# Altium footprint library CoilcraftPCB.PcbLib: 320 footprints (part 10 of 20)
Each footprint in its own frame and in the unit in brackets; x right, y up, seen from the top. Pads: shape width x height; smd on the part's side, far side on the other; paste and mask are expansions set on the pad; w line width, h text height; cw(c..) or ccw(c..) is an arc to the next point about the centre after c.
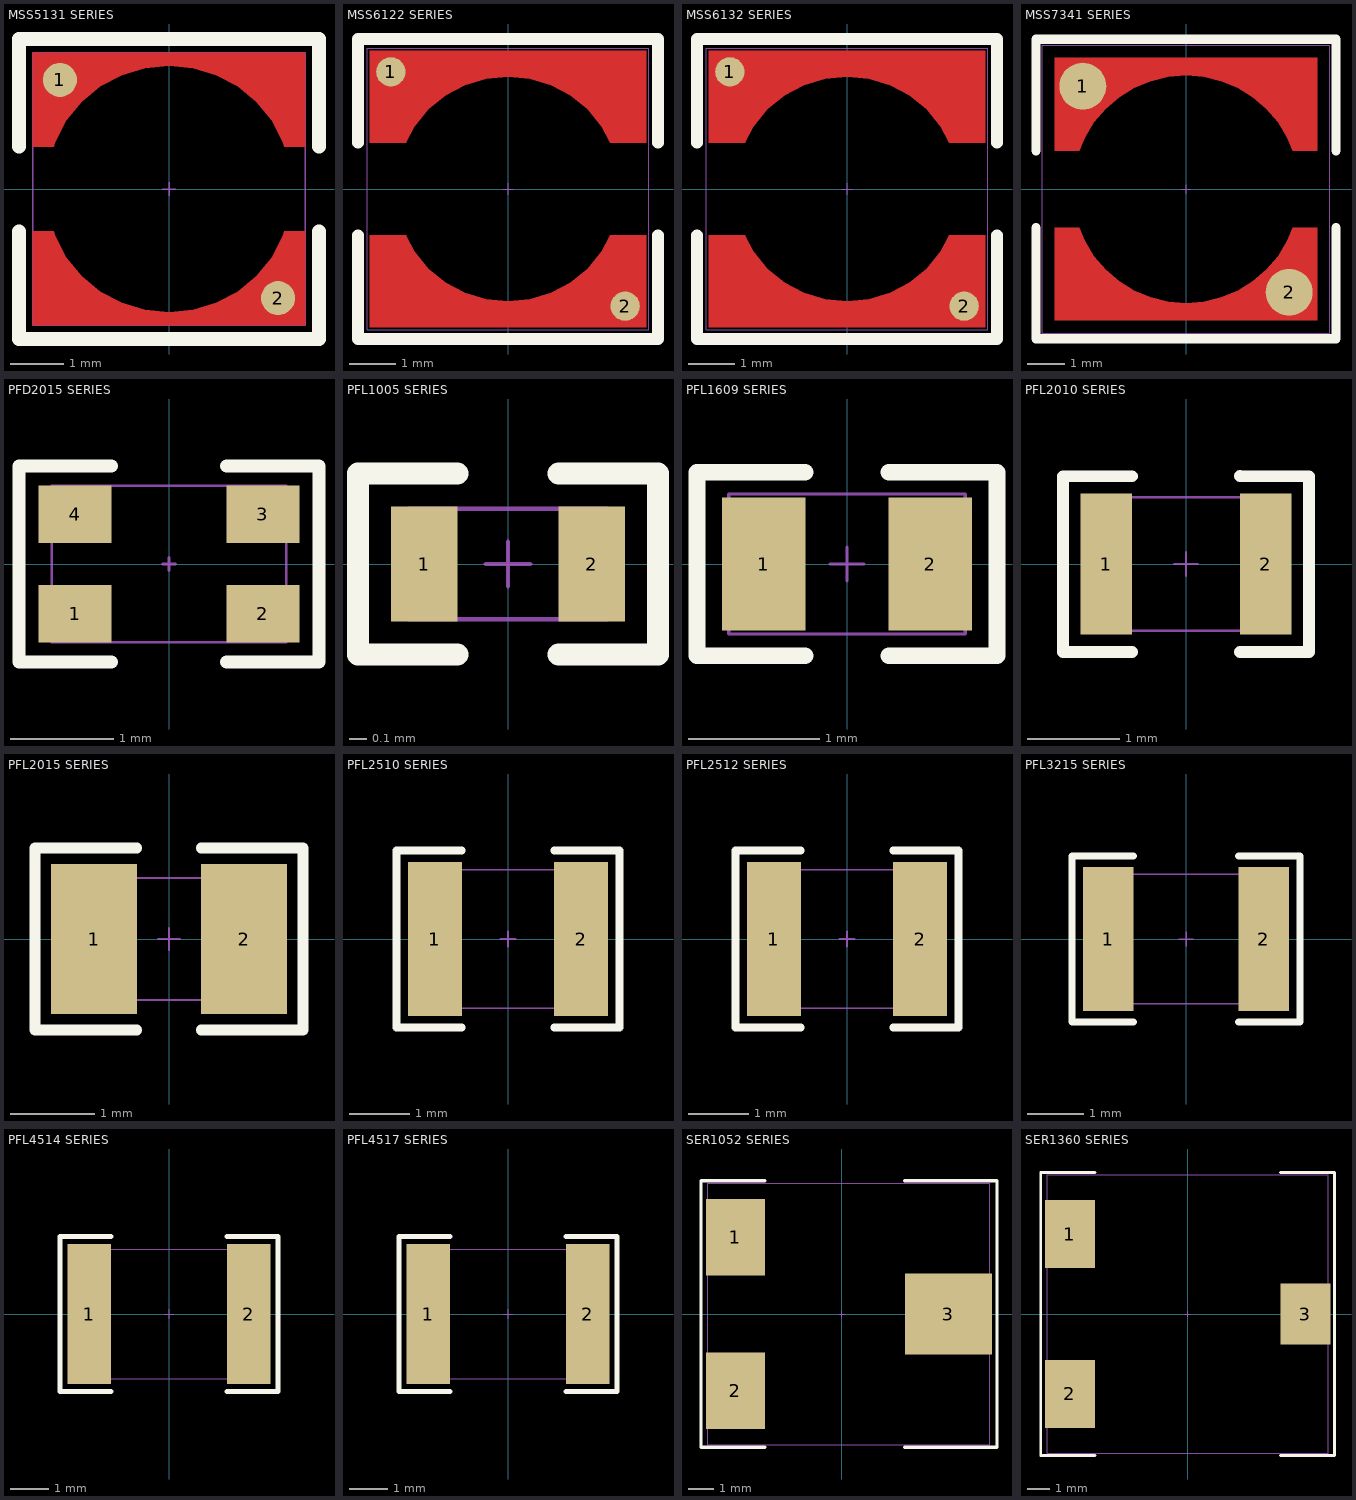
[diagram p9: the footprints below, top view; thin cyan lines are the x and y axes]

## MSS5131 SERIES [mil] "Coilcraft Shielded Power Inductors"
height 122
pads (2):
  round 25 smd mask+0: 1(-80,80) 2(80,-80)
Top Layer:
  region: -100,31 -84.49,31 -84.63,31.05 -83.55,34.61 -75.19,50.24 -63.95,63.95 -50.24,75.19 -34.61,83.55 -17.64,88.7 0,90.44 17.64,88.7 34.61,83.55 50.24,75.19 63.95,63.95 75.19,50.24 83.55,34.61 84.63,31.05 84.49,31 100,31 100,100 -100,100
  region: 100,-31 84.49,-31 84.63,-31.05 83.55,-34.61 75.19,-50.24 63.95,-63.95 50.24,-75.19 34.61,-83.55 17.64,-88.7 0,-90.44 -17.64,-88.7 -34.61,-83.55 -50.24,-75.19 -63.95,-63.95 -75.19,-50.24 -83.55,-34.61 -84.63,-31.05 -84.49,-31 -100,-31 -100,-100 100,-100
Top Overlay:
  lines w10: -110,-31 -110,-110 110,-110 110,-31 ; -110,31 -110,110 110,110 110,31
Top Paste:
  region: 100,-31 84.49,-31 84.63,-31.05 83.55,-34.61 75.19,-50.24 63.95,-63.95 50.24,-75.19 34.61,-83.55 17.64,-88.7 0,-90.44 -17.64,-88.7 -34.61,-83.55 -50.24,-75.19 -63.95,-63.95 -75.19,-50.24 -83.55,-34.61 -84.63,-31.05 -84.49,-31 -100,-31 -100,-100 100,-100
  region: -100,31 -84.49,31 -84.63,31.05 -83.55,34.61 -75.19,50.24 -63.95,63.95 -50.24,75.19 -34.61,83.55 -17.64,88.7 0,90.44 17.64,88.7 34.61,83.55 50.24,75.19 63.95,63.95 75.19,50.24 83.55,34.61 84.63,31.05 84.49,31 100,31 100,100 -100,100
Mechanical 13:
  lines w1: -5,0 5,0 ; 0,-5 0,5
Mechanical 14:
  lines w1: -100,-100 -100,100 100,100 100,-100 -100,-100
3D body: height 122.17, standoff 0.13, extent -106.24,-106.24 106.24,106.24

## MSS6122 SERIES [mil] "Coilcraft Shielded Power Inductors"
height 87
pads (2):
  round 25 smd mask+0: 1(-100,100) 2(100,-100)
Top Layer:
  region: 118,-39.5 118,-118 -118,-118 -118,-39.5 -86.96,-39.5 -87.14,-39.56 -79.79,-53.31 -67.86,-67.86 -53.31,-79.79 -36.72,-88.66 -18.72,-94.12 0,-95.96 18.72,-94.12 36.72,-88.66 53.31,-79.79 67.86,-67.86 79.79,-53.31 87.14,-39.56 86.96,-39.48 86.96,-39.5
  region: -118,39.5 -118,118 118,118 118,39.5 86.96,39.5 87.14,39.56 79.79,53.31 67.86,67.86 53.31,79.79 36.72,88.66 18.72,94.12 0,95.96 -18.72,94.12 -36.72,88.66 -53.31,79.79 -67.86,67.86 -79.79,53.31 -87.14,39.56 -86.96,39.48 -86.96,39.5
Top Overlay:
  lines w10: -128,-39.5 -128,-128 128,-128 128,-39.5 ; -128,39.5 -128,128 128,128 128,39.5
Top Paste:
  region: -118,39.5 -118,118 118,118 118,39.5 86.96,39.5 87.14,39.56 79.79,53.31 67.86,67.86 53.31,79.79 36.72,88.66 18.72,94.12 0,95.96 -18.72,94.12 -36.72,88.66 -53.31,79.79 -67.86,67.86 -79.79,53.31 -87.14,39.56 -86.96,39.48 -86.96,39.5
  region: 118,-39.5 118,-118 -118,-118 -118,-39.5 -86.96,-39.5 -87.14,-39.56 -79.79,-53.31 -67.86,-67.86 -53.31,-79.79 -36.72,-88.66 -18.72,-94.12 0,-95.96 18.72,-94.12 36.72,-88.66 53.31,-79.79 67.86,-67.86 79.79,-53.31 87.14,-39.56 86.96,-39.48 86.96,-39.5
Mechanical 13:
  lines w1: -5,0 5,0 ; 0,-5 0,5
Mechanical 14:
  lines w1: -120,-120 120,-120 120,120 -120,120 -120,-120
3D body: height 86.74, standoff 0.13, extent -118,-118 117.99,117.99

## MSS6132 SERIES [mil] "Coilcraft Shielded Power Inductors"
height 126
pads (2):
  round 25 smd mask+0: 1(-100,100) 2(100,-100)
Top Layer:
  region: 118,-39.5 118,-118 -118,-118 -118,-39.5 -86.96,-39.5 -87.14,-39.56 -79.79,-53.31 -67.86,-67.86 -53.31,-79.79 -36.72,-88.66 -18.72,-94.12 0,-95.96 18.72,-94.12 36.72,-88.66 53.31,-79.79 67.86,-67.86 79.79,-53.31 87.14,-39.56 86.96,-39.48 86.96,-39.5
  region: -118,39.5 -118,118 118,118 118,39.5 86.96,39.5 87.14,39.56 79.79,53.31 67.86,67.86 53.31,79.79 36.72,88.66 18.72,94.12 0,95.96 -18.72,94.12 -36.72,88.66 -53.31,79.79 -67.86,67.86 -79.79,53.31 -87.14,39.56 -86.96,39.48 -86.96,39.5
Top Overlay:
  lines w10: -128,-39.5 -128,-128 128,-128 128,-39.5 ; -128,39.5 -128,128 128,128 128,39.5
Top Paste:
  region: -118,39.5 -118,118 118,118 118,39.5 86.96,39.5 87.14,39.56 79.79,53.31 67.86,67.86 53.31,79.79 36.72,88.66 18.72,94.12 0,95.96 -18.72,94.12 -36.72,88.66 -53.31,79.79 -67.86,67.86 -79.79,53.31 -87.14,39.56 -86.96,39.48 -86.96,39.5
  region: 118,-39.5 118,-118 -118,-118 -118,-39.5 -86.96,-39.5 -87.14,-39.56 -79.79,-53.31 -67.86,-67.86 -53.31,-79.79 -36.72,-88.66 -18.72,-94.12 0,-95.96 18.72,-94.12 36.72,-88.66 53.31,-79.79 67.86,-67.86 79.79,-53.31 87.14,-39.56 86.96,-39.48 86.96,-39.5
Mechanical 13:
  lines w1: -5,0 5,0 ; 0,-5 0,5
Mechanical 14:
  lines w1: -120,-120 120,-120 120,120 -120,120 -120,-120
3D body: height 126.11, standoff 0.13, extent -117.99,-117.99 118,118

## MSS7341 SERIES [mil] "Coilcraft Shielded Power Inductors"
height 161
pads (2):
  round 50 smd mask+0: 1(-110,110) 2(110,-110)
Top Layer:
  region: 140,-41 140,-140 -140,-140 -140,-41 -113.97,-41.05 -108.15,-55.1 -98.19,-71.34 -85.82,-85.82 -71.34,-98.19 -55.1,-108.15 -37.51,-115.43 -18.99,-119.88 0,-121.37 18.99,-119.88 37.51,-115.43 55.1,-108.15 71.34,-98.19 85.82,-85.82 98.19,-71.34 108.15,-55.1 113.97,-41.05 113.84,-41
  region: -140,41 -140,140 140,140 140,41 113.84,41 113.97,41.05 108.15,55.1 98.19,71.34 85.82,85.82 71.34,98.19 55.1,108.15 37.51,115.43 18.99,119.88 0,121.37 -18.99,119.88 -37.51,115.43 -55.1,108.15 -71.34,98.19 -85.82,85.82 -98.19,71.34 -108.15,55.1 -113.97,41.05 -113.84,41
Top Overlay:
  lines w10: -160,-41 -160,-159.5 160,-159.5 160,-41 ; -160,41 -160,160 160,160 160,41
Top Paste:
  region: -140,41 -140,140 140,140 140,41 113.84,41 113.97,41.05 108.15,55.1 98.19,71.34 85.82,85.82 71.34,98.19 55.1,108.15 37.51,115.43 18.99,119.88 0,121.37 -18.99,119.88 -37.51,115.43 -55.1,108.15 -71.34,98.19 -85.82,85.82 -98.19,71.34 -108.15,55.1 -113.97,41.05 -113.84,41
  region: 140,-41 140,-140 -140,-140 -140,-41 -113.97,-41.05 -108.15,-55.1 -98.19,-71.34 -85.82,-85.82 -71.34,-98.19 -55.1,-108.15 -37.51,-115.43 -18.99,-119.88 0,-121.37 18.99,-119.88 37.51,-115.43 55.1,-108.15 71.34,-98.19 85.82,-85.82 98.19,-71.34 108.15,-55.1 113.97,-41.05 113.84,-41
Mechanical 13:
  lines w1: -5,0 5,0 ; 0,-5 0,5
Mechanical 14:
  lines w1: -153.5,-153.5 153.5,-153.5 153.5,153.5 -153.5,153.5 -153.5,-153.5
3D body: height 161.54, standoff 0.13, extent -148.82,-148.82 148.81,148.81

## PFD2015 SERIES [mil] "Coilcraft Dual Coil Inductors"
height 59
pads (4):
  rect 28x22 smd: 1(-36,-19) 2(36,-19) 3(36,19) 4(-36,19)
Top Overlay:
  lines w5: -22,-37.5 -57.5,-37.5 -57.5,37.5 -22,37.5 ; 22,-37.5 57.5,-37.5 57.5,37.5 22,37.5
Mechanical 13:
  lines w1: -2.5,0 2.5,0 ; 0,-2.5 0,2.5
Mechanical 14:
  lines w1: -45,-30 -45,30 45,30 45,-30 -45,-30
3D body: height 55.91, standoff 0, extent -45.08,-29.92 45.08,29.92

## PFL1005 SERIES [mil] "Coilcraft Shielded Power Inductors"
height 28
pads (2):
  rect 15x26 smd: 1(-19,0) 2(19,0)
Top Overlay:
  lines w5: -11.5,-20.5 -34,-20.5 -34,20.5 -11.5,20.5 ; 11.5,-20.5 34,-20.5 34,20.5 11.5,20.5
Mechanical 13:
  lines w1: -5,0 5,0 ; 0,-5 0,5
Mechanical 14:
  lines w1: -22.5,-12.5 -22.5,12.5 22.5,12.5 22.5,-12.5 -22.5,-12.5
3D body: height 27.76, standoff -0.2, extent -22.5,-12.76 22.5,12.75

## PFL1609 SERIES [mil] "Coilcraft Shielded Power Inductors"
height 37
pads (2):
  rect 25x40 smd: 1(-25,0) 2(25,0)
Top Overlay:
  lines w5: -12.5,-27.5 -45,-27.5 -45,27.5 -12.5,27.5 ; 12.5,-27.5 45,-27.5 45,27.5 12.5,27.5
Mechanical 13:
  lines w1: -5,0 5,0 ; 0,-5 0,5
Mechanical 14:
  lines w1: -35.5,-21 35.5,-21 35.5,21 -35.5,21 -35.5,-21
3D body: height 37.01, standoff -0.39, extent -35.44,-21.06 35.43,21.07

## PFL2010 SERIES [mil] "Coilcraft Shielded Power Inductors"
height 39
pads (2):
  rect 22x60 smd: 1(-34,0) 2(34,0)
Top Overlay:
  lines w5: -23,-37.5 -52.5,-37.5 -52.5,37.5 -23,37.5 ; 23,-37.5 52.5,-37.5 52.5,37.5 23,37.5
Mechanical 13:
  lines w1: -5,0 5,0 ; 0,-5 0,5
Mechanical 14:
  lines w1: -43.5,-28.5 -43.5,28.5 43.5,28.5 43.5,-28.5 -43.5,-28.5
3D body: height 38.98, standoff -0.39, extent -43.31,-28.54 43.3,28.55

## PFL2015 SERIES [mil] "Coilcraft Shielded Power Inductors"
height 59
pads (2):
  rect 40x70 smd: 1(-35,0) 2(35,0)
Top Overlay:
  lines w5: -15,-42.5 -62.5,-42.5 -62.5,42.5 -15,42.5 ; 15,-42.5 62.5,-42.5 62.5,42.5 15,42.5
Mechanical 13:
  lines w1: -5,0 5,0 ; 0,-5 0,5
Mechanical 14:
  lines w1: -43.5,-28.5 43.5,-28.5 43.5,28.5 -43.5,28.5 -43.5,-28.5
3D body: height 58.66, standoff -0.39, extent -43.31,-28.54 43.3,28.55

## PFL2510 SERIES [mil] "Coilcraft Shielded Power Inductors"
height 40
pads (2):
  rect 35x100 smd: 1(-47.5,0) 2(47.5,0)
Top Overlay:
  lines w5: -30,-57.5 -72.5,-57.5 -72.5,57.5 -30,57.5 ; 30,-57.5 72.5,-57.5 72.5,57.5 30,57.5
Mechanical 13:
  lines w1: -5,0 5,0 ; 0,-5 0,5
Mechanical 14:
  lines w1: -55,-45 -55,45 55,45 55,-45 -55,-45
3D body: height 39.76, standoff -0.39, extent -54.92,-45 54.92,45

## PFL2512 SERIES [mil] "Coilcraft Shielded Power Inductors"
height 48
pads (2):
  rect 35x100 smd: 1(-47.5,0) 2(47.5,0)
Top Overlay:
  lines w5: -30,-57.5 -72.5,-57.5 -72.5,57.5 -30,57.5 ; 30,-57.5 72.5,-57.5 72.5,57.5 30,57.5
Mechanical 13:
  lines w1: -5,0 5,0 ; 0,-5 0,5
Mechanical 14:
  lines w1: -55,-45 55,-45 55,45 -55,45 -55,-45
3D body: height 47.64, standoff -0.39, extent -54.92,-45 54.92,45

## PFL3215 SERIES [mil] "Coilcraft Shielded Power Inductors"
height 59
pads (2):
  rect 35x100 smd: 1(-54,0) 2(54,0)
Top Overlay:
  lines w5: -36.5,-57.5 -79,-57.5 -79,57.5 -36.5,57.5 ; 36.5,-57.5 79,-57.5 79,57.5 36.5,57.5
Mechanical 13:
  lines w1: -5,0 5,0 ; 0,-5 0,5
Mechanical 14:
  lines w1: -63,-45 -63,45 63,45 63,-45 -63,-45
3D body: height 58.66, standoff -0.39, extent -62.99,-45 63,45

## PFL4514 SERIES [mil] "Coilcraft Shielded Power Inductors"
height 55
pads (2):
  rect 45x145 smd: 1(-82.5,0) 2(82.5,0)
Top Overlay:
  lines w5: -60,-80 -112.5,-80 -112.5,80 -60,80 ; 60,-80 112.5,-80 112.5,80 60,80
Mechanical 13:
  lines w1: -5,0 5,0 ; 0,-5 0,5
Mechanical 14:
  lines w1: -96.5,-67 96.5,-67 96.5,67 -96.5,67 -96.5,-67
3D body: height 53.15, standoff -0.39, extent -96.46,-66.92 96.45,66.93

## PFL4517 SERIES [mil] "Coilcraft Shielded Power Inductors"
height 67
pads (2):
  rect 45x145 smd: 1(-82.5,0) 2(82.5,0)
Top Overlay:
  lines w5: -60,-80 -112.5,-80 -112.5,80 -60,80 ; 60,-80 112.5,-80 112.5,80 60,80
Mechanical 13:
  lines w1: -5,0 5,0 ; 0,-5 0,5
Mechanical 14:
  lines w1: -96.5,-67 96.5,-67 96.5,67 -96.5,67 -96.5,-67
3D body: height 64.96, standoff -0.39, extent -96.46,-66.92 96.45,66.93

## SER1052 SERIES [mil] "Coilcraft Shielded Power Inductors"
height 205
pads (3):
  rect 91x118 smd: 1(-163.75,118) 2(-163.75,-118)
  rect 134x125 smd: 3(163.75,0)
Top Overlay:
  lines w5: -118.5,-205 -216.5,-205 -216.5,205 -118.5,205 ; 96.5,-205 238.5,-205 238.5,204.99 96.5,205
Mechanical 13:
  lines w1: -5,0 5,0 ; 0,-5 0,5
Mechanical 14:
  lines w1: -206.5,-201 -206.5,201 227,201 227,-201 -206.5,-201
3D body: height 204.76, standoff 0.03, extent -211.46,-204.72 231.46,204.72

## SER1360 SERIES [mil] "Coilcraft Shielded Power Inductors"
height 215
pads (3):
  rect 89x121 smd: 1(-209.5,142) 2(-209.5,-142)
  rect 89x109 smd: 3(209.5,0)
Top Overlay:
  lines w5: -165,-252 -261.5,-252 -261.5,252 -165,252 ; 165,-252 261.5,-252 261.5,251.99 165,252
Mechanical 13:
  lines w1: -5,0 5,0 ; 0,-5 0,5
Mechanical 14:
  lines w1: -250,-248 250,-248 250,248 -250,248 -250,-248
3D body: height 228.38, standoff 0.03, extent -255.91,-253.94 255.9,253.93